# Altium footprint library ADS8688IDBTR.PcbLib: 3 footprints
Each footprint in its own frame and in the unit in brackets; x right, y up, seen from the top. Pads: shape width x height; smd on the part's side, far side on the other; paste and mask are expansions set on the pad; w line width, h text height; cw(c..) or ccw(c..) is an arc to the next point about the centre after c.
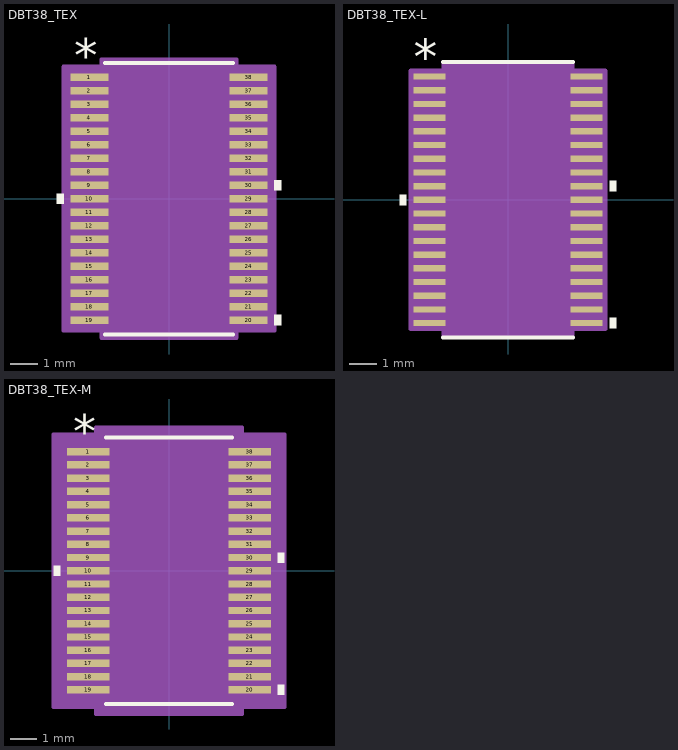
[diagram p0: the footprints below, top view; thin cyan lines are the x and y axes]

## DBT38_TEX [mil]
pads (38):
  rect 55.28x11 smd paste+0 mask+0: 1(-116.14,177.17) 2(-116.14,157.48) 3(-116.14,137.8) 4(-116.14,118.11) 5(-116.14,98.43) 6(-116.14,78.74) 7(-116.14,59.06) 8(-116.14,39.37) 9(-116.14,19.68) 10(-116.14,0) 11(-116.14,-19.68) 12(-116.14,-39.37) 13(-116.14,-59.06) 14(-116.14,-78.74) 15(-116.14,-98.43) 16(-116.14,-118.11) 17(-116.14,-137.8) 18(-116.14,-157.48) 19(-116.14,-177.17) 20(116.14,-177.17) 21(116.14,-157.48) 22(116.14,-137.8) 23(116.14,-118.11) 24(116.14,-98.43) 25(116.14,-78.74) 26(116.14,-59.06) 27(116.14,-39.37) 28(116.14,-19.68) 29(116.14,0) 30(116.14,19.69) 31(116.14,39.37) 32(116.14,59.06) 33(116.14,78.74) 34(116.14,98.43) 35(116.14,118.11) 36(116.14,137.8) 37(116.14,157.48) 38(116.14,177.17)
Top Overlay:
  region: -153.78,7.5 -163.78,7.5 -163.78,-7.5 -153.78,-7.5
  region: 153.78,-169.67 163.78,-169.67 163.78,-184.67 153.78,-184.67
  region: 153.78,27.19 163.78,27.19 163.78,12.19 153.78,12.19
  lines w6: -93.5,-198 93.5,-198 ; -93.5,198 93.5,198
  text "*" at -138.64,183.17 h50
  text ".Designator" at -137.5,-25 h50
Mechanical 13:
  drawing of 157 lines, arcs and shapes, not listed
  text ".Designator" at -137.5,-25 h50
  text "*" at -86,140 h50
Mechanical 15:
  region: -98.5,-192.67 -153.78,-192.67 -153.78,192.67 -98.5,192.67 -98.5,203 98.5,203 98.5,192.67 153.78,192.67 153.78,-192.67 98.5,-192.67 98.5,-203 -98.5,-203
  lines w6: -153.78,-192.67 -153.78,192.67 -98.5,192.67 -98.5,203 98.5,203 98.5,192.67 153.78,192.67 153.78,-192.67 98.5,-192.67 98.5,-203 -98.5,-203 -98.5,-192.67 -153.78,-192.67
3D body "DBT38_TEX.step": height 47.09, standoff 0, extent -130,-192.99 130,192.99

## DBT38_TEX-L [mm]
pads (38):
  rect 1.162x0.229 smd paste+0 mask+0: 1(-2.871,4.5) 2(-2.871,4) 3(-2.871,3.5) 4(-2.871,3) 5(-2.871,2.5) 6(-2.871,2) 7(-2.871,1.5) 8(-2.871,1) 9(-2.871,0.5) 10(-2.871,0) 11(-2.871,-0.5) 12(-2.871,-1) 13(-2.871,-1.5) 14(-2.871,-2) 15(-2.871,-2.5) 16(-2.871,-3) 17(-2.871,-3.5) 18(-2.871,-4) 19(-2.871,-4.5) 20(2.871,-4.5) 21(2.871,-4) 22(2.871,-3.5) 23(2.871,-3) 24(2.871,-2.5) 25(2.871,-2) 26(2.871,-1.5) 27(2.871,-1) 28(2.871,-0.5) 29(2.871,0) 30(2.871,0.5) 31(2.871,1) 32(2.871,1.5) 33(2.871,2) 34(2.871,2.5) 35(2.871,3) 36(2.871,3.5) 37(2.871,4) 38(2.871,4.5)
Top Overlay:
  region: -3.706,0.191 -3.96,0.191 -3.96,-0.191 -3.706,-0.191
  region: 3.706,-4.309 3.96,-4.309 3.96,-4.69 3.706,-4.69
  region: 3.706,0.691 3.96,0.691 3.96,0.31 3.706,0.31
  lines w0.152: -2.375,-5.029 2.375,-5.029 ; -2.375,5.029 2.375,5.029
  text "*" at -3.443,4.602 h1.27
  text ".Designator" at -3.492,-0.635 h1.27
Mechanical 13:
  drawing of 157 lines, arcs and shapes, not listed
  text ".Designator" at -3.492,-0.635 h1.27
  text "*" at -2.184,3.556 h1.27
Mechanical 15:
  region: -2.349,-4.716 -3.554,-4.716 -3.554,4.716 -2.349,4.716 -2.349,5.004 2.349,5.004 2.349,4.716 3.554,4.716 3.554,-4.716 2.349,-4.716 2.349,-5.004 -2.349,-5.004
  lines w0.152: -3.554,-4.716 -3.554,4.716 -2.349,4.716 -2.349,5.004 2.349,5.004 2.349,4.716 3.554,4.716 3.554,-4.716 2.349,-4.716 2.349,-5.004 -2.349,-5.004 -2.349,-4.716 -3.554,-4.716
3D body "DBT38_TEX.step": height 1.2, standoff 0, extent -3.302,-4.902 3.302,4.902

## DBT38_TEX-M [mil]
pads (38):
  rect 63.15x11 smd paste+0 mask+0: 1(-120.08,177.17) 2(-120.08,157.48) 3(-120.08,137.8) 4(-120.08,118.11) 5(-120.08,98.43) 6(-120.08,78.74) 7(-120.08,59.06) 8(-120.08,39.37) 9(-120.08,19.68) 10(-120.08,0) 11(-120.08,-19.68) 12(-120.08,-39.37) 13(-120.08,-59.06) 14(-120.08,-78.74) 15(-120.08,-98.43) 16(-120.08,-118.11) 17(-120.08,-137.8) 18(-120.08,-157.48) 19(-120.08,-177.17) 20(120.08,-177.17) 21(120.08,-157.48) 22(120.08,-137.8) 23(120.08,-118.11) 24(120.08,-98.43) 25(120.08,-78.74) 26(120.08,-59.06) 27(120.08,-39.37) 28(120.08,-19.68) 29(120.08,0) 30(120.08,19.69) 31(120.08,39.37) 32(120.08,59.06) 33(120.08,78.74) 34(120.08,98.43) 35(120.08,118.11) 36(120.08,137.8) 37(120.08,157.48) 38(120.08,177.17)
Top Overlay:
  region: -161.65,7.5 -171.65,7.5 -171.65,-7.5 -161.65,-7.5
  region: 161.65,-169.67 171.65,-169.67 171.65,-184.67 161.65,-184.67
  region: 161.65,27.19 171.65,27.19 171.65,12.19 161.65,12.19
  lines w6: -93.5,-198 93.5,-198 ; -93.5,198 93.5,198
  text "*" at -142.58,183.17 h50
  text ".Designator" at -137.5,-25 h50
Mechanical 13:
  drawing of 157 lines, arcs and shapes, not listed
  text ".Designator" at -137.5,-25 h50
  text "*" at -86,140 h50
Mechanical 15:
  region: -108.5,-202.67 -171.65,-202.67 -171.65,202.67 -108.5,202.67 -108.5,213 108.5,213 108.5,202.67 171.65,202.67 171.65,-202.67 108.5,-202.67 108.5,-213 -108.5,-213
  lines w6: -171.65,-202.67 -171.65,202.67 -108.5,202.67 -108.5,213 108.5,213 108.5,202.67 171.65,202.67 171.65,-202.67 108.5,-202.67 108.5,-213 -108.5,-213 -108.5,-202.67 -171.65,-202.67
3D body "DBT38_TEX.step": height 47.09, standoff 0, extent -130,-192.99 130,192.99